# Altium integrated library Diodes.IntLib: 23 symbols
Pins are listed as number, name and electrical type; pins without a type are passive.

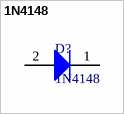
[diagram p0: symbol 1N4148]

## 1N4148
designator D?
footprint DIOD-SOD123-2_V (SOD123, 2-Leads, Body 2.7x1.55mm, Height 1.45mm)
pins: 1 K, 2 A


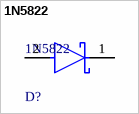
[diagram p1: symbol 1N5822]

## 1N5822
designator D?
DIODE SCHOTTKY 40V 3A DO201AD; Manufacturer: STMicroelectronics; Max Junction Temp: +150°C; Peak Reverse Current: 2mA; Max Surge Forward Current: 80A; Temperature Range High: +150°C; Automotive: No; RoHS: TRUE; ComponentLink2Description: Datasheet; Manufacturer Part Number: 1N5822; Lead Free: Yes; Octopart: https://octopart.com/1n5822-stmicroelectronics-323225; Device Class L2: Diodes; Max Repetitive Reverse Voltage: 40V; Temperature: to +150°C; Height: 5.3mm; Category: Diode; Digikey Description: DIODE SCHOTTKY 40V 3A DO201AD; ComponentLink2URL: https://www.st.com/resource/en/datasheet/1n5822.pdf; Device Class L3: Schottky Diodes; Device Class L1: Discrete Semiconductors; Forward Current: 3A; Mouser Description: Schottky Diodes & Rectifiers Vr/40V Io/3A BULK; Package: DO-201AD
footprint FP-DO-201AD-MFG
pins: 1 C, 2 A


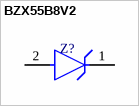
[diagram p2: symbol BZX55B8V2]

## BZX55B8V2
designator Z?  (value not drawn)
footprint BZX55B8V2
pins: 1 C, 2 A


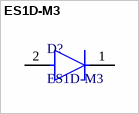
[diagram p3: symbol ES1D-M3]

## ES1D-M3
designator D?
footprint FP-SMA-MFG
pins: 1 C, 2 A


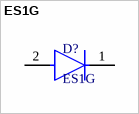
[diagram p4: symbol ES1G]

## ES1G
designator D?
Ultrafast
footprint FP-403AE-MFG
pins: 1 C, 2 A


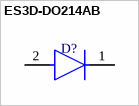
[diagram p5: symbol ES3D-DO214AB]

## ES3D-DO214AB
designator D?  (value not drawn)
ES3D-DO214AB
footprint DO214-AB
pins: 1 C, 2 A


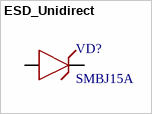
[diagram p6: symbol ESD_Unidirect]

## ESD_Unidirect
designator VD?, comment SMBJ15A
footprint DO-214AA
footprint SOD-323
footprint SMF3.3A
pins: 1 C, 2 A


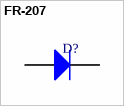
[diagram p7: symbol FR-207]

## FR-207
designator D?  (value not drawn)
FR207
footprint FR207
footprint FP-DO-201AD-MFG
pins: 1 K, 2 A


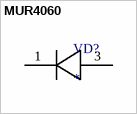
[diagram p8: symbol MUR4060]

## MUR4060
designator VD?
footprint TO-247-2
footprint TO-247-2_Vishay
pins: 1, 3


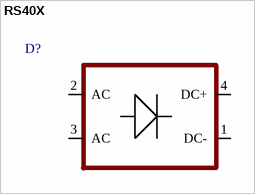
[diagram p9: symbol RS40X]

## RS40X
designator D?
footprint RS40X
pins: 1 DC-, 2 AC, 3 AC, 4 DC+


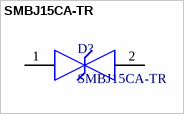
[diagram p10: symbol SMBJ15CA-TR]

## SMBJ15CA-TR
designator D?
footprint FP-SMB-CA-MFG
pins: 1, 2


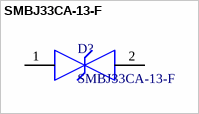
[diagram p11: symbol SMBJ33CA-13-F]

## SMBJ33CA-13-F
designator D?
TVS DIODE 33V 53.3V SMB
footprint FP-SMB-CA-MFG
pins: 1, 2


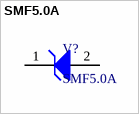
[diagram p12: symbol SMF5.0A]

## SMF5.0A
designator V?
SMF5.0A SOD-123
footprint SOD-123
pins: 1 K, 2 A


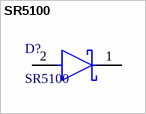
[diagram p13: symbol SR5100]

## SR5100
designator D?
footprint SR5100(DO-201AD
pins: 1 C, 2 A


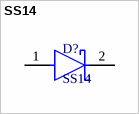
[diagram p14: symbol SS14]

## SS14
designator D?
footprint DO-214-AC
pins: 1 A, 2 C


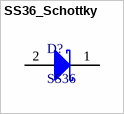
[diagram p15: symbol SS36_Schottky]

## SS36_Schottky
designator D?, comment SS36
footprint SMC/DO214AB
pins: 1 K, 2 A


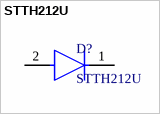
[diagram p16: symbol STTH212U]

## STTH212U
designator D?
DIODE GEN PURP 1.2KV 2A SMB
footprint FP-SMB-MFG
pins: 1 K, 2 A


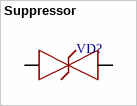
[diagram p17: symbol Suppressor]

## Suppressor
designator VD?
footprint DO201AB
footprint P6KE350CA
footprint SOD-323
footprint DO-214AA
pins: 1 C, 2 A


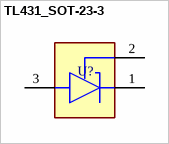
[diagram p18: symbol TL431_SOT-23-3]

## TL431_SOT-23-3
designator U?, comment TL431  (value not drawn)
TL431_SOT-23-3
footprint TL431_SOT-23-3(A)
footprint TL431_SOT-23-3(B)
footprint TL431_SOT-23-3(C)
footprint TL431_SOT-23-3(MGF)
pins: 1 C, 2 REF, 3 A


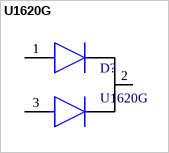
[diagram p19: symbol U1620G]

## U1620G
designator D?
footprint TO-220(bend2)
footprint TO-220_Bended_Rad
footprint TO-220_lay
footprint TO-220(bend1)
pins: 1 A, 2 C, 3 A


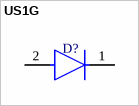
[diagram p20: symbol US1G]

## US1G
designator D?  (value not drawn)
footprint US1G_SMA
footprint DO-214AA
pins: 1 C, 2 A


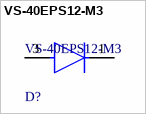
[diagram p21: symbol VS-40EPS12-M3]

## VS-40EPS12-M3
designator D?
DIODE GP 1.2KV 40A TO247AC; Series: -; Case/Package: TO-247-2; Mount: Through Hole; Max Reverse Voltage (DC): 1.2kV; RoHS Compliant: Yes; Packaging: Rail/Tube; Average Rectified Current: 40A
footprint TO-247-2_Vishay
footprint TO-247-2
pins: 1 C, 3 A


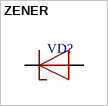
[diagram p22: symbol ZENER]

## ZENER
designator VD?
footprint DO-35
footprint DO-017AA
footprint DIOD-SOD123-2_V (SOD123, 2-Leads, Body 2.7x1.55mm, Height 1.45mm)
footprint SOD-323
pins: 1 C, 2 A